# Altium integrated library VARISTOR.IntLib: 1 symbol
Pins are listed as number, name and electrical type; pins without a type are passive.

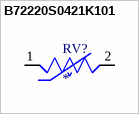
[diagram p0: symbol B72220S0421K101]

## B72220S0421K101
designator RV?
Varistor: metal-oxide; THT; 420VAC; 560VDC; 680V; 8000A; 175J; MF: EPCOS; MP: B72220S0421K101; SnapEDA_Link: https://www.snapeda.com/parts/B72220S0421K101/EPCOS/view-part/?ref=snap; Package: Disc-20 EPCOS - TDK Electronics; Value: *; Check_prices: https://www.snapeda.com/parts/B72220S0421K101/EPCOS/view-part/?ref=eda
footprint VAR_B72220S0421K101
pins: 1, 2